# Altium footprint library GRM32ER71A226KE20L.PcbLib: 3 footprints
Each footprint in its own frame and in the unit in brackets; x right, y up, seen from the top. Pads: shape width x height; smd on the part's side, far side on the other; paste and mask are expansions set on the pad; w line width, h text height; cw(c..) or ccw(c..) is an arc to the next point about the centre after c.
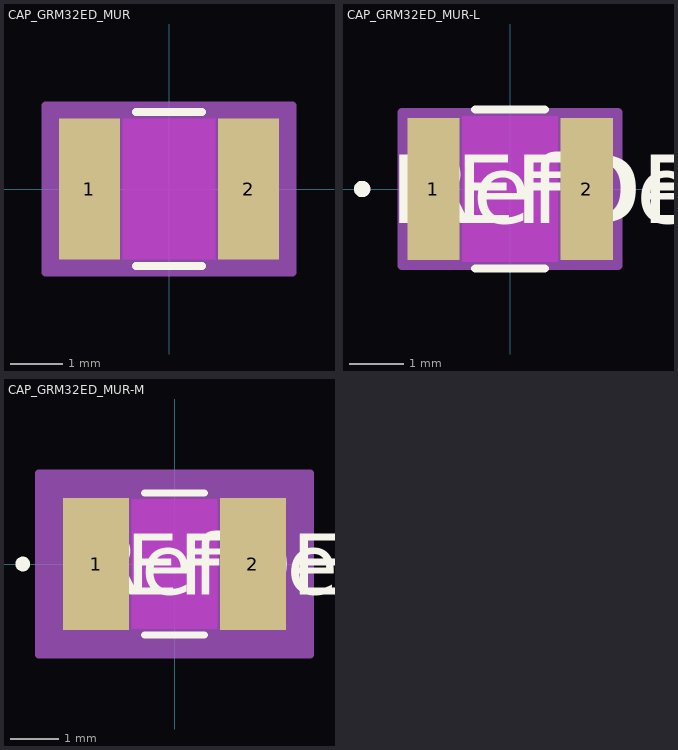
[diagram p0: the footprints below, top view; thin cyan lines are the x and y axes]

## CAP_GRM32ED_MUR [mil]
pads (2):
  rect 46x106 smd paste+0 mask+0: 1(-60,0) 2(60,0)
Top Layer keep-out:
  region: -35,-51 -35,51 35,51 35,-51
Top Overlay:
  lines w6: -24.89,-58 24.89,-58 ; -24.89,58 24.89,58
Keep-Out Layer:
  region: -35,-53 -35,53 35,53 35,-53
Mechanical 13:
  lines w1: -69,-53 -69,53 ; -69,-53 -37,-53 -37,53 -69,53 ; -69,-53 69,-53 ; -69,-53 -69,53 ; -69,53 69,53 ; 69,-53 37,-53 37,53 69,53 ; 69,-53 69,53 ; 69,-53 69,53
Mechanical 15:
  region: 93,-63 -93,-63 -93,63 93,63
  lines w6: -93,-63 -93,63 93,63 93,-63 -93,-63
3D body "CAP_GRM32ED_MUR.step": height 105.98, standoff 0, extent -69.02,-52.99 69.02,52.99

## CAP_GRM32ED_MUR-L [mil]
pads (2):
  rect 38x104 smd paste+0 mask+0: 1(-56,0) 2(56,0)
Top Layer keep-out:
  region: -35,-51 -35,51 35,51 35,-51
Top Overlay:
  circle w6: c-108,0 r3
  lines w6: -25.35,-58 25.35,-58 ; -25.35,58 25.35,58
  text "RefDes" at -75,-25 h50
  text "REFDES" at -87.5,-25 h50
Keep-Out Layer:
  region: -35,-53 -35,53 35,53 35,-53
Mechanical 13:
  circle w0: c-51,0 r3
  lines w1: -69,-53 -69,53 ; -69,-53 -37,-53 -37,53 -69,53 ; -69,-53 69,-53 ; -69,-53 -69,53 ; -69,53 69,53 ; 69,-53 37,-53 37,53 69,53 ; 69,-53 69,53 ; 69,-53 69,53
  text "RefDes2" at -87.5,-25 h50
Mechanical 15:
  region: 79,-56 -79,-56 -79,56 79,56
  lines w6: -79,-56 -79,56 79,56 79,-56 -79,-56
3D body "CAP_GRM32ED_MUR.step": height 105.98, standoff 0, extent -69.02,-52.99 69.02,52.99

## CAP_GRM32ED_MUR-M [mil]
pads (2):
  rect 54x108 smd paste+0 mask+0: 1(-64,0) 2(64,0)
Top Layer keep-out:
  region: -35,-51 -35,51 35,51 35,-51
Top Overlay:
  circle w6: c-124,0 r3
  lines w6: -24.53,-58 24.53,-58 ; -24.53,58 24.53,58
  text "RefDes" at -75,-25 h50
  text "REFDES" at -87.5,-25 h50
Keep-Out Layer:
  region: -35,-53 -35,53 35,53 35,-53
Mechanical 13:
  circle w0: c-59,0 r3
  lines w1: -69,-53 -69,53 ; -69,-53 -37,-53 -37,53 -69,53 ; -69,-53 69,-53 ; -69,-53 -69,53 ; -69,53 69,53 ; 69,-53 37,-53 37,53 69,53 ; 69,-53 69,53 ; 69,-53 69,53
  text "RefDes2" at -87.5,-25 h50
Mechanical 15:
  region: 111,-74 -111,-74 -111,74 111,74
  lines w6: -111,-74 -111,74 111,74 111,-74 -111,-74
3D body "CAP_GRM32ED_MUR.step": height 105.98, standoff 0, extent -69.02,-52.99 69.02,52.99